# Altium schematic symbol library ECS-TXO-2520MV-120-AY-TR.SchLib: 1 symbol
Pins are listed as number, name and electrical type; pins without a type are passive.

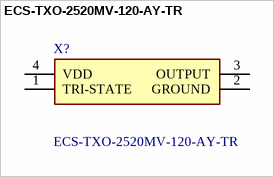
[diagram p0: symbol ECS-TXO-2520MV-120-AY-TR]

## ECS-TXO-2520MV-120-AY-TR
designator X?
TCXO Oscillators MultiVolt OSC TCXO 12.000MHZ CMOS SMD ECS-TXO-2520MV 12MHz CMOS +1.7V +3.6V +/-2.5ppm -30 C 85 C - Surface Mount 0.098" L x 0.079" W (2.50mm x 2.00mm) 0.035" (0.90mm) 4-SMD, No Lead (DFN, LCC); Manufacturer_Name: ECS; Geometry.Height: 1mm; Mouser Part Number: 520-TXO2520MV120AYTR; Mouser Price/Stock: https://www.mouser.co.uk/ProductDetail/ECS/ECS-TXO-2520MV-120-AY-TR?qs=bAKSY%2FctAC6B08N7%252By9row%3D%3D; Manufacturer_Part_Number: ECS-TXO-2520MV-120-AY-TR; Datasheet Link: https://ecsxtal.com/store/pdf/ECS-TXO-2520MV.pdf
footprint ECSTXO2520MV120AYTR
pins: 1 TRI-STATE, 2 GROUND, 3 OUTPUT, 4 VDD